# Altium integrated library passive.IntLib: 122 symbols (part 1 of 2)
Pins are listed as number, name and electrical type; pins without a type are passive.

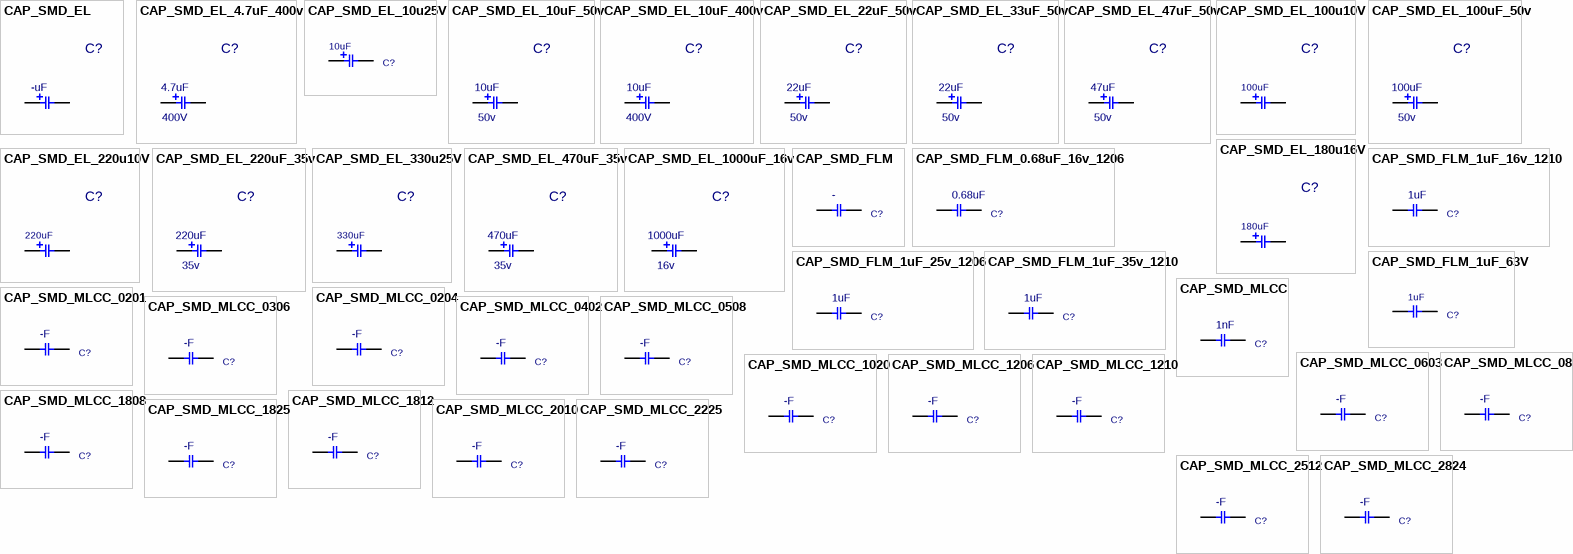
[diagram p0: symbols CAP_SMD_EL to CAP_SMD_MLCC_2824]

## CAP_SMD_EL
designator C?, comment -uF
CAP, SMD, ELEC,; MANF_P#: MANF_PART#; PARAM2: -V; DESC: DESCRIPTION; DIST#: MOUSER; PARAM: 20%; PRICE: 10= -$; MANF: MANF; ASSEMBLY: ASSEMBLY; VALUE: -uF
footprint C_EL_D8L6 (Electrolytic Cap, 8.3X6)
footprint C_EL_D4L4 (Electrolytic Cap, D: 4.3mm, Size B, 3.9mm Height)
footprint C_EL_D5L6 (Electrolytic Cap, D: 5.0mm, L: 5.8mm, Size C)
footprint C_EL_D6L5 (Electrolytic Cap, D: 6.3mm L: 5.4mm, Size D)
footprint C_EL_D10L9 (Electrolytic Cap, 10.3mm, L: 8.7mm)
footprint C_EL_D12L13 (Electrolytic Cap, 12.5x13mm)
footprint C_EL_D4L5 (Electrolytic Cap, D: 4.3mm, Size B, 5.5mm Height)
footprint C_EL_D3L5 (Electrolytic Cap, D: 3.3mm, Size A, 5mm Height)
footprint C_EL_D6L4 (Electrolytic Cap, D: 6.3mm L: 3.9mm, Size D)
footprint C_EL_D6L5A (Electrolytic Cap, D: 6.3mm L: 5.4mm, Size D)
footprint C_EL_D6L6 (Electrolytic Cap, D: 6.3mm L: 5.8mm, Size D)
footprint C_EL_D6L8 (Electrolytic Cap, D: 6.3mm L: 7.7mm, Size D)
footprint C_EL_D8L10 (Electrolytic Cap, Size E, Size F, 8.3X10)
footprint C_EL_D10L10 (Electrolytic Cap, 10.3mm, L: 10mm)
footprint C_EL_D10L12 (Electrolytic Cap, 10.3mm, L: 12.4mm)
footprint C_EL_D16L16 (Electrolytic Cap, 16x16.5mm, size J)
footprint C_EL_D18L16 (Electrolytic Cap, 18x16.5mm, size K)
footprint C_EL_D8L10A (Electrolytic Cap, Size E, Size F, 8.3X10)
footprint C_EL_D5L5 (Electrolytic Cap, D: 5.0mm, L: 5.4mm)
pins: 1, 2

## CAP_SMD_EL_4.7uF_400v
designator C?, comment PARAM2: 400V  (hidden comment: 4.7uF)
CAP, SMD, ELEC,; MANF_P#: MANF_PART#; DESC: DESCRIPTION; DIST#: MOUSER; PARAM: 20%; PRICE: 10= -$; MANF: MANF; ASSEMBLY: ASSEMBLY; VALUE: 4.7uF
footprint C_EL_D8L10 (Electrolytic Cap, Size E, Size F, 8.3X10)
footprint C_EL_D10L10 (Electrolytic Cap, 10.3mm, L: 10mm)
pins: 1, 2

## CAP_SMD_EL_10u25V
designator C?, comment 10uF
CAP, SMD, ELEC, 10uF, 25V; MANF_P#: MANF_PART#; PARAM: 25V; MANF: MANF; PARAM2: PARAM2; VALUE: 10uF
footprint C_EL_4X7 (Capacitor Electrolythic, D4.0X7.0H pitch: 1.5mm)
pins: 1, 2

## CAP_SMD_EL_10uF_50v
designator C?, comment PARAM2: 50v  (hidden comment: 10uF)
CAP, SMD, ELEC,; MANF_P#: MANF_PART#; DESC: DESCRIPTION; DIST#: MOUSER; PARAM: 20%; PRICE: 10= -$; MANF: MANF; ASSEMBLY: ASSEMBLY; VALUE: 10uF
footprint C_EL_D5L5 (Electrolytic Cap, D: 5.0mm, L: 5.4mm)
pins: 1, 2

## CAP_SMD_EL_10uF_400v
designator C?, comment PARAM2: 400V  (hidden comment: 10uF)
CAP, SMD, ELEC,; MANF_P#: MANF_PART#; DESC: DESCRIPTION; DIST#: MOUSER; PARAM: 20%; PRICE: 10= -$; MANF: MANF; ASSEMBLY: ASSEMBLY; VALUE: 10uF
footprint C_EL_D10L12 (Electrolytic Cap, 10.3mm, L: 12.4mm)
pins: 1, 2

## CAP_SMD_EL_22uF_50v
designator C?, comment PARAM2: 50v  (hidden comment: 22uF)
CAP, SMD, ELEC,; MANF_P#: MANF_PART#; DESC: DESCRIPTION; DIST#: MOUSER; PARAM: 20%; PRICE: 10= -$; MANF: MANF; ASSEMBLY: ASSEMBLY; VALUE: 22uF
footprint C_EL_D6L5 (Electrolytic Cap, D: 6.3mm L: 5.4mm, Size D)
pins: 1, 2

## CAP_SMD_EL_33uF_50v
designator C?, comment PARAM2: 50v  (hidden comment: 22uF)
CAP, SMD, ELEC,; MANF_P#: MANF_PART#; DESC: DESCRIPTION; DIST#: MOUSER; PARAM: 20%; PRICE: 10= -$; MANF: MANF; ASSEMBLY: ASSEMBLY; VALUE: 22uF
footprint C_EL_D6L8 (Electrolytic Cap, D: 6.3mm L: 7.7mm, Size D)
pins: 1, 2

## CAP_SMD_EL_47uF_50v
designator C?, comment PARAM2: 50v  (hidden comment: 47uF)
CAP, SMD, ELEC,; MANF_P#: MANF_PART#; DESC: DESCRIPTION; DIST#: MOUSER; PARAM: 20%; PRICE: 10= -$; MANF: MANF; ASSEMBLY: ASSEMBLY; VALUE: 47uF
footprint C_EL_D6L8 (Electrolytic Cap, D: 6.3mm L: 7.7mm, Size D)
pins: 1, 2

## CAP_SMD_EL_100u10V
designator C?, comment 100uF
CAP, SMDD, ELEC, 100uF, 10V; MANF_P#: 875105242010; MANF: Wurth Electronics; DESC: Aluminum Organic Polymer; DIST#: MOUSER; PARAM: 20%, 30mOhmESR, -55~105oC; PRICE: 0.56$; PARAM2: 10V; ASSEMBLY: ASSEMBLY; VALUE: 100uF
footprint C_EL_5 (Electrolytic Cap, D: 5.0mm, L: 5.8mm, Size C)
pins: 1, 2

## CAP_SMD_EL_100uF_50v
designator C?, comment PARAM2: 50v  (hidden comment: 100uF)
CAP, SMD, ELEC,; MANF_P#: MANF_PART#; DESC: DESCRIPTION; DIST#: MOUSER; PARAM: 20%; PRICE: 10= -$; MANF: MANF; ASSEMBLY: ASSEMBLY; VALUE: 100uF
footprint C_EL_D8L10 (Electrolytic Cap, Size E, Size F, 8.3X10)
pins: 1, 2

## CAP_SMD_EL_180u16V
designator C?, comment 180uF
CAP, SMD, ELEC,; MANF_P#: 16SVPE180M; PARAM2: 16V; MANF: Panasonic; DESC: Aluminum Organic Polymer; DIST#: MOUSER; PARAM: 20%, 11mOhmESR, -55~105oC; PRICE: 0.8$; ASSEMBLY: ASSEMBLY; VALUE: 180uF
footprint C_EL_6_8 (Electrolytic Cap, D: 6.3mm L: 7.7mm, Size D)
pins: 1, 2

## CAP_SMD_EL_220u10V
designator C?, comment 220uF
CAP, SMDD, ELEC, 220uF, 10V; MANF_P#: 875105244013; MANF: Wurth Electronics; DESC: Aluminum Organic Polymer; DIST#: MOUSER; PARAM: 20%, 30mOhmESR, -55~105oC; PRICE: 0.66$; PARAM2: 10V; ASSEMBLY: ASSEMBLY; VALUE: 220uF
footprint C_EL_6_6 (Electrolytic Cap, D: 6.3mm L: 5.8mm, Size D)
pins: 1, 2

## CAP_SMD_EL_220uF_35v
designator C?, comment PARAM2: 35v  (hidden comment: 220uF)
CAP, SMD, ELEC,; MANF_P#: MANF_PART#; DESC: DESCRIPTION; DIST#: MOUSER; PARAM: 20%; PRICE: 10= -$; MANF: MANF; ASSEMBLY: ASSEMBLY; VALUE: 220uF
footprint C_EL_D8L10 (Electrolytic Cap, Size E, Size F, 8.3X10)
pins: 1, 2

## CAP_SMD_EL_330u25V
designator C?, comment 330uF
CAP, SMDD, ELEC, 330uF, 25V; MANF_P#: EEE-1EA331UP; PARAM2: 20%; MANF: PANASONIC; DESC: DESCRIPTION; DIST#: MOUSER; PRICE: 10= 5$; ASSEMBLY: ASSEMBLY; PARAM: 25V; VALUE: 330uF
footprint C_EL_8 (Electrolytic Capacitor, Size E, Size F, 8X10)
pins: 1, 2

## CAP_SMD_EL_470uF_35v
designator C?, comment PARAM2: 35v  (hidden comment: 470uF)
CAP, SMD, ELEC,; MANF_P#: MANF_PART#; DESC: DESCRIPTION; DIST#: MOUSER; PARAM: 20%; PRICE: 10= -$; MANF: MANF; ASSEMBLY: ASSEMBLY; VALUE: 470uF
footprint C_EL_D10L10 (Electrolytic Cap, 10.3mm, L: 10mm)
pins: 1, 2

## CAP_SMD_EL_1000uF_16v
designator C?, comment PARAM2: 16v  (hidden comment: 1000uF)
CAP, SMD, ELEC,; MANF_P#: MANF_PART#; DESC: DESCRIPTION; DIST#: MOUSER; PARAM: 20%; PRICE: 10= -$; MANF: MANF; ASSEMBLY: ASSEMBLY; VALUE: 1000uF
footprint C_EL_D10L10 (Electrolytic Cap, 10.3mm, L: 10mm)
pins: 1, 2

## CAP_SMD_FLM
designator C?, comment -
CAP, FILM,; PARAM: Acrylic, MetallizedStacked, 20%, -40~85oC; MANF_P#: ECP-U1C684MA5; MANF: Panasonic; PARAM2: 16V; PRICE: 100= 40$; DESC: -; ASSEMBLY: ASSEMBLY; VALUE: -
footprint C1206 (CHIP Capacitor, 3.2X1.6mm, 1206)
pins: 1, 2

## CAP_SMD_FLM_0.68uF_16v_1206
designator C?, comment 0.68uF
CAP, FILM,; PARAM: Acrylic, MetallizedStacked, 20%, -40~85oC; MANF_P#: ECP-U1C684MA5; MANF: Panasonic; PARAM2: 16V; PRICE: 100= 40$; DESC: -; ASSEMBLY: ASSEMBLY; VALUE: 0.68uF
footprint C1206 (CHIP Capacitor, 3.2X1.6mm, 1206)
pins: 1, 2

## CAP_SMD_FLM_1uF_16v_1210
designator C?, comment 1uF
CAP, FILM,; PARAM: Acrylic, MetallizedStacked, 20%, -40~85oC; MANF_P#: ECP-U1C105MA5; MANF: Panasonic; PARAM2: 16V; PRICE: 100= 36$; DESC: -; ASSEMBLY: ASSEMBLY; VALUE: 1uF
footprint C1210 (CHIP Capacitor, 3.2X2.5mm, 1210, 3225)
pins: 1, 2

## CAP_SMD_FLM_1uF_25v_1206
designator C?, comment 1uF
CAP, FILM,; PARAM: AcrylicMetallized, 20%, -55~125oC; MANF_P#: 25MU105MA23216; MANF: Rubycon; PARAM2: 25V; PRICE: 100= 290$; DESC: -; ASSEMBLY: ASSEMBLY; VALUE: 1uF
footprint C1206 (CHIP Capacitor, 3.2X1.6mm, 1206)
pins: 1, 2

## CAP_SMD_FLM_1uF_35v_1210
designator C?, comment 1uF
CAP, FILM,; PARAM: AcrylicMetallized, 20%, -55~125oC; MANF_P#: 35ST105MB13225; MANF: Rubycon; PARAM2: 35V; PRICE: 100= 270$; DESC: -; ASSEMBLY: ASSEMBLY; VALUE: 1uF
footprint C1210 (CHIP Capacitor, 3.2X2.5mm, 1210, 3225)
pins: 1, 2

## CAP_SMD_FLM_1uF_63V
designator C?, comment 1uF
CAP, FILM; PARAM: PET, 10%, -55~125oC; DESC: CAP, FILM,; MANF_P#: SMDTC04100QB00KQ00; MANF: WIMA; PARAM2: 63VDC/40VAC; PRICE: 2$; ASSEMBLY: ASSEMBLY; VALUE: 1uF
footprint C2225 (Chip Capacitor, 5.6x6.4mm, 2225, 5664, 2220)
pins: 1, 2

## CAP_SMD_MLCC
designator C?, comment 1nF
CAP, MLCC; PARAM: C0G, 10%; DESC: CAP, MLCC, 1nF, 50V, C0G, 10%, 0402; MANF_P#: MANF_PART#; MANF: Murata; PARAM2: 50V; PRICE: 100= 1$; ASSEMBLY: ASSEMBLY; VALUE: 1nF
footprint C0402 (CHIP Capacitor, 1.0X0.5mm, 0402)
footprint C0603 (CHIP Capacitor, 1.6X0.8mm, 0603)
footprint C0805 (CHIP Capacitor, 2.0X1.3mm, 0805)
footprint C1206 (CHIP Capacitor, 3.2X1.6mm, 1206)
footprint C1210 (CHIP Capacitor, 3.2X2.5mm, 1210, 3225)
footprint C0508 (CHIP Capacitor, 1.3X2.0mm, 0508)
footprint C1020 (CHIP Capacitor, 2.50x5.00mm)
footprint C1808 (CHIP Capacitor, 4.6X2.0mm, 1808, 1806, 4620, 4520)
footprint C1812 (Chip Capacitor, 4.5x3.2mm, 1612, 1812, 4532)
footprint C1825 (Chip Capacitor, 4.5x6.4mm, 1825, 4564)
footprint C2225 (Chip Capacitor, 5.6x6.4mm, 2225, 5664)
footprint C2512 (Chip Capacitor, 6.4x3.2mm, 2512, 6432)
footprint C0201 (CHIP Capacitor, 0.5x0.25mm, 0201)
footprint C0306 (CHIP Capacitor, 0.8X1.6mm)
footprint C0204 (CHIP Capacitor, 0.5X1.0mm)
footprint C2010 (Chip Capacitor, 5.0x2.5mm)
pins: 1, 2

## CAP_SMD_MLCC_0201
designator C?, comment -F
CAP, MLCC; PARAM: -, -%; MANF_P#: MANF_PART#; PARAM2: -V; PRICE: 100= 1$; MANF: -; ASSEMBLY: ASSEMBLY; VALUE: -F
footprint C0201 (CHIP Capacitor, 0.5x0.25mm, 0201)
pins: 1, 2

## CAP_SMD_MLCC_0204
designator C?, comment -F
CAP, MLCC; PARAM: -, -%; MANF_P#: MANF_PART#; PARAM2: -V; PRICE: 100= 1$; MANF: -; ASSEMBLY: ASSEMBLY; VALUE: -F
footprint C0204 (CHIP Capacitor, 0.5X1.0mm)
pins: 1, 2

## CAP_SMD_MLCC_0306
designator C?, comment -F
CAP, MLCC; PARAM: -, -%; MANF_P#: MANF_PART#; PARAM2: -V; PRICE: 100= 1$; MANF: -; ASSEMBLY: ASSEMBLY; VALUE: -F
footprint C0306 (CHIP Capacitor, 0.8X1.6mm)
pins: 1, 2

## CAP_SMD_MLCC_0402
designator C?, comment -F
CAP, MLCC; PARAM: -, -%; MANF_P#: MANF_PART#; PARAM2: -V; PRICE: 100= 1$; MANF: -; ASSEMBLY: ASSEMBLY; VALUE: -F
footprint C0402 (CHIP Capacitor, 1.0X0.5mm, 0402)
pins: 1, 2

## CAP_SMD_MLCC_0508
designator C?, comment -F
CAP, MLCC; PARAM: -, -%; MANF_P#: MANF_PART#; PARAM2: -V; PRICE: 100= 1$; MANF: -; ASSEMBLY: ASSEMBLY; VALUE: -F
footprint C0508 (CHIP Capacitor, 1.3X2.0mm, 0508)
pins: 1, 2

## CAP_SMD_MLCC_0603
designator C?, comment -F
CAP, MLCC; PARAM: -, -%; MANF_P#: MANF_PART#; PARAM2: -V; PRICE: 100= 1$; MANF: -; ASSEMBLY: ASSEMBLY; VALUE: -F
footprint C0603 (CHIP Capacitor, 1.6X0.8mm, 0603)
pins: 1, 2

## CAP_SMD_MLCC_0805
designator C?, comment -F
CAP, MLCC; PARAM: -, -%; MANF_P#: MANF_PART#; PARAM2: -V; PRICE: 100= 1$; MANF: -; ASSEMBLY: ASSEMBLY; VALUE: -F
footprint C0805 (CHIP Capacitor, 2.0X1.3mm, 0805)
pins: 1, 2

## CAP_SMD_MLCC_1020
designator C?, comment -F
CAP, MLCC; PARAM: -, -%; MANF_P#: MANF_PART#; PARAM2: -V; PRICE: 100= 1$; MANF: -; ASSEMBLY: ASSEMBLY; VALUE: -F
footprint C1020 (CHIP Capacitor, 2.50x5.00mm)
pins: 1, 2

## CAP_SMD_MLCC_1206
designator C?, comment -F
CAP, MLCC; PARAM: -, -%; MANF_P#: MANF_PART#; PARAM2: -V; PRICE: 100= 1$; MANF: -; ASSEMBLY: ASSEMBLY; VALUE: -F
footprint C1206 (CHIP Capacitor, 3.2X1.6mm, 1206)
pins: 1, 2

## CAP_SMD_MLCC_1210
designator C?, comment -F
CAP, MLCC; PARAM: -, -%; MANF_P#: MANF_PART#; PARAM2: -V; PRICE: 100= 1$; MANF: -; ASSEMBLY: ASSEMBLY; VALUE: -F
footprint C1210 (CHIP Capacitor, 3.2X2.5mm, 1210, 3225)
pins: 1, 2

## CAP_SMD_MLCC_1808
designator C?, comment -F
CAP, MLCC; PARAM: -, -%; MANF_P#: MANF_PART#; PARAM2: -V; PRICE: 100= 1$; MANF: -; ASSEMBLY: ASSEMBLY; VALUE: -F
footprint C1808 (CHIP Capacitor, 4.6X2.0mm, 1808, 1806, 4620, 4520)
pins: 1, 2

## CAP_SMD_MLCC_1812
designator C?, comment -F
CAP, MLCC; PARAM: -, -%; MANF_P#: MANF_PART#; PARAM2: -V; PRICE: 100= 1$; MANF: -; ASSEMBLY: ASSEMBLY; VALUE: -F
footprint C1812 (Chip Capacitor, 4.5x3.2mm, 1612, 1812, 4532)
pins: 1, 2

## CAP_SMD_MLCC_1825
designator C?, comment -F
CAP, MLCC; PARAM: -, -%; MANF_P#: MANF_PART#; PARAM2: -V; PRICE: 100= 1$; MANF: -; ASSEMBLY: ASSEMBLY; VALUE: -F
footprint C1825 (Chip Capacitor, 4.5x6.4mm, 1825, 4564)
pins: 1, 2

## CAP_SMD_MLCC_2010
designator C?, comment -F
CAP, MLCC; PARAM: -, -%; MANF_P#: MANF_PART#; PARAM2: -V; PRICE: 100= 1$; MANF: -; ASSEMBLY: ASSEMBLY; VALUE: -F
footprint C2010 (Chip Capacitor, 5.0x2.5mm)
pins: 1, 2

## CAP_SMD_MLCC_2225
designator C?, comment -F
CAP, MLCC; PARAM: -, -%; MANF_P#: MANF_PART#; PARAM2: -V; PRICE: 100= 1$; MANF: -; ASSEMBLY: ASSEMBLY; VALUE: -F
footprint C2225 (Chip Capacitor, 5.6x6.4mm, 2225, 5664, 2220)
pins: 1, 2

## CAP_SMD_MLCC_2512
designator C?, comment -F
CAP, MLCC; PARAM: -, -%; MANF_P#: MANF_PART#; PARAM2: -V; PRICE: 100= 1$; MANF: -; ASSEMBLY: ASSEMBLY; VALUE: -F
footprint C2512 (Chip Capacitor, 6.4x3.2mm, 2512, 6432)
pins: 1, 2

## CAP_SMD_MLCC_2824
designator C?, comment -F
CAP, MLCC; PARAM: -, -%; MANF_P#: MANF_PART#; PARAM2: -V; PRICE: 100= 1$; MANF: -; ASSEMBLY: ASSEMBLY; VALUE: -F
footprint C2824 (Chip Capacitor, 7.2x6.1x3mm, 2824)
pins: 1, 2

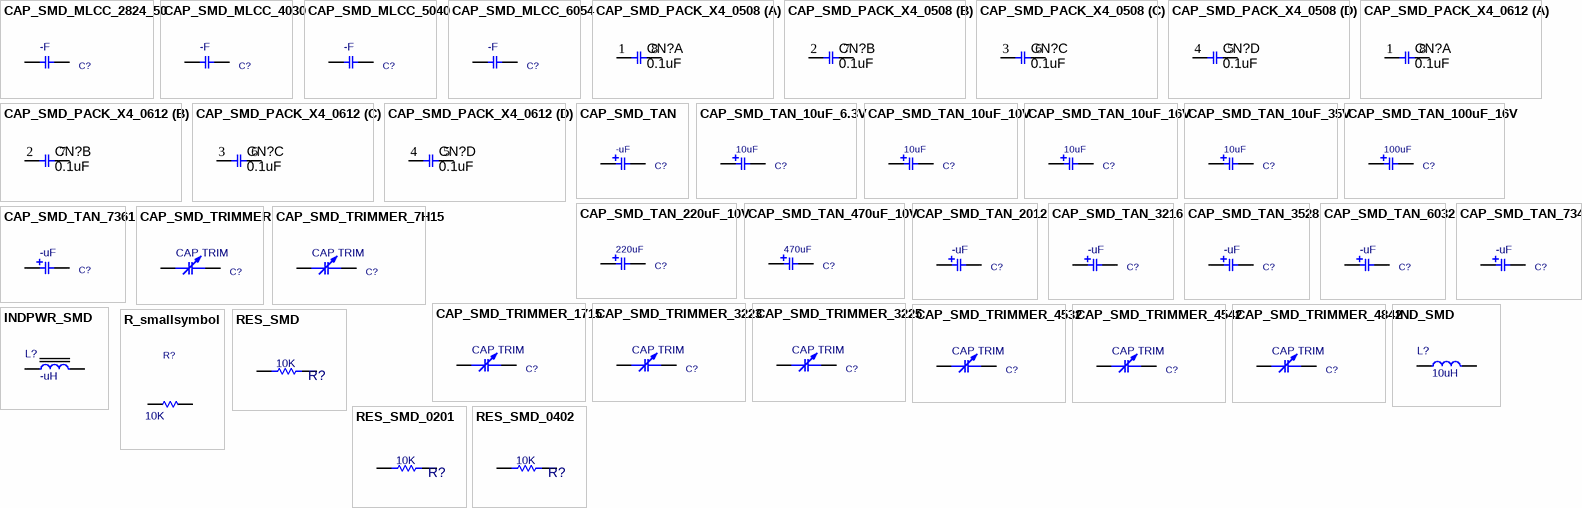
[diagram p1: symbols CAP_SMD_MLCC_2824_50 to RES_SMD_0402]

## CAP_SMD_MLCC_2824_50
designator C?, comment -F
CAP, MLCC; PARAM: -, -%; MANF_P#: MANF_PART#; PARAM2: -V; PRICE: 100= 1$; MANF: -; ASSEMBLY: ASSEMBLY; VALUE: -F
footprint C2824_50 (Chip Capacitor, 7.2x6.1x5mm, 2824)
pins: 1, 2

## CAP_SMD_MLCC_4030
designator C?, comment -F
CAP, MLCC; PARAM: -, -%; MANF_P#: MANF_PART#; PARAM2: -V; PRICE: 100= 1$; MANF: -; ASSEMBLY: ASSEMBLY; VALUE: -F
footprint C4030 (Chip Capacitor, 10.2x7.6x5mm, 4030)
pins: 1, 2

## CAP_SMD_MLCC_5040
designator C?, comment -F
CAP, MLCC; PARAM: -, -%; MANF_P#: MANF_PART#; PARAM2: -V; PRICE: 100= 1$; MANF: -; ASSEMBLY: ASSEMBLY; VALUE: -F
footprint C5040 (Chip Capacitor, 12.7x10.2x6mm, 5040)
pins: 1, 2

## CAP_SMD_MLCC_6054
designator C?, comment -F
CAP, MLCC; PARAM: -, -%; MANF_P#: MANF_PART#; PARAM2: -V; PRICE: 100= 1$; MANF: -; ASSEMBLY: ASSEMBLY; VALUE: -F
footprint C6054 (Chip Capacitor, 15.3x13.7x7mm, 6054)
pins: 1, 2

## CAP_SMD_PACK_X4_0508
designator CN?, comment value 0.1uF  (hidden comment: Film Res Pack)
CAP, SMD, PACKX4; MANF_P#: MANF_PART#; MANF: MANF
footprint CP0402X4 (Capacitor Network, 0508, 0402X4, 1.3x2.0mm)
part A pins: 1, 8
part B pins: 2, 7
part C pins: 3, 6
part D pins: 4, 5

## CAP_SMD_PACK_X4_0612
designator CN?, comment value 0.1uF  (hidden comment: Film Res Pack)
CAP, SMD, PACKX4; MANF_P#: MANF_PART#; MANF: MANF
footprint CP0603X4 (Capacitor Network 0612, 0603X4, 1.6x3.2mm)
part A pins: 1, 8
part B pins: 2, 7
part C pins: 3, 6
part D pins: 4, 5

## CAP_SMD_TAN
designator C?, comment -uF
CAP, SMD, TAN; PARAM: 20%, 300mOhm, -55~105oC; MANF: VISHAY; MANF_P#: T55A106M6R3C0300; PARAM2: 6.3V; PRICE: 0.46$; VALUE: -uF
footprint C_TN_3528 (CAPACITOR, TAN B, TAN H, TAN T, TAN M, 3528P, 1210P, 3.5X2.8mm)
footprint C_TN_3216 (CAPACITOR, TAN A, 1206P, 3.2x1.6mm)
footprint C_TN_2012 (CAPACITOR, TAN N, TAN P, TAN R, 0805P, 2X1.3mm)
footprint C_TN_3216_BLK (CAPACITOR, TAN A, 3.2x1.6mm, BLACK)
footprint C_TN_3528_BLK (CAPACITOR, TAN B, 3.5X2.8mm, BLACK)
footprint C_TN_6032 (CAPACITOR, TAN C, TAN F, TAN U, TAN L, 6032P, 6.0X3.2mm)
footprint C_TN_6032_BLK (CAPACITOR, TAN C, 6.0X3.2mm, BLACK)
footprint C_TN_7343 (CAPACITOR, TAN D, TAN E, TAN Y, TAN X, 7343P, 7.3X4.3mm)
footprint C_TN_7343_31 (CAPACITOR, TAN D, TAN E, TAN Y, TAN X, 7343P, 7.3X4.3mm)
footprint C_TN_7343_31_BLK (CAPACITOR, TAN D, 7.3X4.3mm, BLACK)
footprint C_TN_7361 (CAPACITOR, TAN V, 2924, 7361, 7.3X6.1mm)
pins: 1, 2

## CAP_SMD_TAN_10uF_6.3V
designator C?, comment 10uF
CAP, SMD, TAN; PARAM: 20%, 300mOhm, -55~105oC; MANF: VISHAY; MANF_P#: T55A106M6R3C0300; PARAM2: 6.3V; PRICE: 0.46$; VALUE: 10uF
footprint C_TN_3216 (CAPACITOR, TAN A, 1206P, 3.2x1.6mm)
pins: 1, 2

## CAP_SMD_TAN_10uF_10V
designator C?, comment 10uF
CAP, SMD, TAN; PARAM: 20%, 300mOhm, -55~105oC; MANF: VISHAY; MANF_P#: T55A106M010C0300; PARAM2: 10V; PRICE: 0.46$; VALUE: 10uF
footprint C_TN_3216 (CAPACITOR, TAN A, 1206P, 3.2x1.6mm)
pins: 1, 2

## CAP_SMD_TAN_10uF_16V
designator C?, comment 10uF
CAP, SMD, TAN; PARAM: 20%, 200mOhm, -55~105oC; MANF: AVX; MANF_P#: TCJT106M016R0200; PARAM2: 16V; PRICE: 1$; VALUE: 10uF
footprint C_TN_3528 (CAPACITOR, TAN B, TAN H, TAN T, TAN M, 3528P, 1210P, 3.5X2.8mm)
pins: 1, 2

## CAP_SMD_TAN_10uF_35V
designator C?, comment 10uF
CAP, SMD, TAN; PARAM: 20%, 300mOhm, -55~125oC; MANF: VISHAY; MANF_P#: 593D106X9035D2TE3; PARAM2: 35V; PRICE: 0.8$; VALUE: 10uF
footprint C_TN_7343 (CAPACITOR, TAN D, TAN E, TAN Y, TAN X, 7343P, 7.3X4.3mm)
pins: 1, 2

## CAP_SMD_TAN_100uF_16V
designator C?, comment 100uF
CAP, SMD, TAN; PARAM: 20%, 50mOhm, -55~105oC; MANF: AVX; MANF_P#: TCJD107M016R0050; PARAM2: 16V; PRICE: 1.9$; VALUE: 100uF
footprint C_TN_7343 (CAPACITOR, TAN D, TAN E, TAN Y, TAN X, 7343P, 7.3X4.3mm)
pins: 1, 2

## CAP_SMD_TAN_220uF_10V
designator C?, comment 220uF
CAP, SMD, TAN; PARAM: 20%, 35mOhm, -55~105oC; MANF: VISHAY; MANF_P#: T55D227M6R3C0035; PARAM2: 6.3V; PRICE: 1.9$; VALUE: 220uF
footprint C_TN_7343 (CAPACITOR, TAN D, TAN E, TAN Y, TAN X, 7343P, 7.3X4.3mm)
pins: 1, 2

## CAP_SMD_TAN_470uF_10V
designator C?, comment 470uF
CAP, SMD, TAN; PARAM: 20%, 50mOhm, -55~105oC; MANF: AVX; MANF_P#: TCN4477M016R0100; PARAM2: 16V; PRICE: 4$; VALUE: 470uF
footprint C_TN_7343 (CAPACITOR, TAN D, TAN E, TAN Y, TAN X, 7343P, 7.3X4.3mm)
pins: 1, 2

## CAP_SMD_TAN_2012
designator C?, comment -uF
CAP, SMD, TAN,; PARAM2: -V; VALUE: -uF
footprint C_TN_2012 (CAPACITOR, TAN N, TAN P, TAN R, 0805P, 2X1.3mm)
pins: 1, 2

## CAP_SMD_TAN_3216
designator C?, comment -uF
CAP, SMD, TAN,; PARAM2: -V; VALUE: -uF
footprint C_TN_3216 (CAPACITOR, TAN A, 1206P, 3.2x1.6mm)
pins: 1, 2

## CAP_SMD_TAN_3528
designator C?, comment -uF
CAP, SMD, TAN,; PARAM2: -V; VALUE: -uF
footprint C_TN_3528 (CAPACITOR, TAN B, TAN H, TAN T, TAN M, 3528P, 1210P, 3.5X2.8mm)
pins: 1, 2

## CAP_SMD_TAN_6032
designator C?, comment -uF
CAP, SMD, TAN,; PARAM2: -V; VALUE: -uF
footprint C_TN_6032 (CAPACITOR, TAN C, TAN F, TAN U, TAN L, 6032P, 6.0X3.2mm)
pins: 1, 2

## CAP_SMD_TAN_7343
designator C?, comment -uF
CAP, SMD, TAN,; PARAM2: -V; VALUE: -uF
footprint C_TN_7343 (CAPACITOR, TAN D, TAN E, TAN Y, TAN X, 7343P, 7.3X4.3mm)
pins: 1, 2

## CAP_SMD_TAN_7361
designator C?, comment -uF
CAP, SMD, TAN,; PARAM2: -V; VALUE: -uF
footprint C_TN_7361 (CAPACITOR, TAN V, 2924, 7361, 7.3X6.1mm)
pins: 1, 2

## CAP_SMD_TRIMMER
designator C?, comment CAP TRIM
CAP, SMD, TRIMMER; MANF_P#: MANF_PART#; PARAM: PARAM; PRICE: 100= 1$; DESC: CAP, SMD, TRIMMER; MANF: MANF; PARAM2: PARAM2; ASSEMBLY: ASSEMBLY; VALUE: CAP TRIM
footprint C_TRM_1715 (Cap, Trimmer TZR1 1.7mmX1.5mm)
footprint C_TRM_3225 (Cap, Trimmer TZY2 3.2mmX2.5mm)
footprint C_TRM_4532 (Cap, Trimmer TZC3 4.5X3.2mm)
footprint C_TRM_4842 (Cap, Trimmer SMD 4.8x4.2mm)
footprint C_TRM_3223 (Cap, Trimmer TZV2 2.3mmX3.2mm)
footprint C_TRM_4542 (Cap, Trimmer TZB4 4.5X4.2mm)
footprint C_TRM_7H15 (Cap Air, Trimmer JOHANSON 1585, >8 Turn, 7.1x H 14.8mm)
pins: 1, 2

## CAP_SMD_TRIMMER_7H15
designator C?, comment CAP TRIM
CAP, SMD, TRIMMER; MANF_P#: MANF_PART#; PARAM: PARAM; PRICE: 100= 1$; DESC: CAP, SMD, TRIMMER; MANF: MANF; PARAM2: PARAM2; ASSEMBLY: ASSEMBLY; VALUE: CAP TRIM
footprint C_TRM_7H15 (Cap Air, Trimmer JOHANSON 1585, >8 Turn, 7.1x H 14.8mm)
pins: 1, 2

## CAP_SMD_TRIMMER_1715
designator C?, comment CAP TRIM
CAP, SMD, TRIMMER; MANF_P#: MANF_PART#; PARAM: PARAM; PRICE: 100= 1$; DESC: CAP, SMD, TRIMMER; MANF: MANF; PARAM2: PARAM2; ASSEMBLY: ASSEMBLY; VALUE: CAP TRIM
footprint C_TRM_1715 (Cap, Trimmer TZR1 1.7mmX1.5mm)
pins: 1, 2

## CAP_SMD_TRIMMER_3223
designator C?, comment CAP TRIM
CAP, SMD, TRIMMER; MANF_P#: MANF_PART#; PARAM: PARAM; PRICE: 100= 1$; DESC: CAP, SMD, TRIMMER; MANF: MANF; PARAM2: PARAM2; ASSEMBLY: ASSEMBLY; VALUE: CAP TRIM
footprint C_TRM_3223 (Cap, Trimmer TZV2 2.3mmX3.2mm)
pins: 1, 2

## CAP_SMD_TRIMMER_3225
designator C?, comment CAP TRIM
CAP, SMD, TRIMMER; MANF_P#: MANF_PART#; PARAM: PARAM; PRICE: 100= 1$; DESC: CAP, SMD, TRIMMER; MANF: MANF; PARAM2: PARAM2; ASSEMBLY: ASSEMBLY; VALUE: CAP TRIM
footprint C_TRM_3225 (Cap, Trimmer TZY2 3.2mmX2.5mm)
pins: 1, 2

## CAP_SMD_TRIMMER_4532
designator C?, comment CAP TRIM
CAP, SMD, TRIMMER; MANF_P#: MANF_PART#; PARAM: PARAM; PRICE: 100= 1$; DESC: CAP, SMD, TRIMMER; MANF: MANF; PARAM2: PARAM2; ASSEMBLY: ASSEMBLY; VALUE: CAP TRIM
footprint C_TRM_4532 (Cap, Trimmer TZC3 4.5X3.2mm)
pins: 1, 2

## CAP_SMD_TRIMMER_4542
designator C?, comment CAP TRIM
CAP, SMD, TRIMMER; MANF_P#: MANF_PART#; PARAM: PARAM; PRICE: 100= 1$; DESC: CAP, SMD, TRIMMER; MANF: MANF; PARAM2: PARAM2; ASSEMBLY: ASSEMBLY; VALUE: CAP TRIM
footprint C_TRM_4542 (Cap, Trimmer TZB4 4.5X4.2mm)
pins: 1, 2

## CAP_SMD_TRIMMER_4842
designator C?, comment CAP TRIM
CAP, SMD, TRIMMER; MANF_P#: MANF_PART#; PARAM: PARAM; PRICE: 100= 1$; DESC: CAP, SMD, TRIMMER; MANF: MANF; PARAM2: PARAM2; ASSEMBLY: ASSEMBLY; VALUE: CAP TRIM
footprint C_TRM_4842 (Cap, Trimmer SMD 4.8x4.2mm)
pins: 1, 2

## IND_SMD
designator L?, comment 10uH
INDUCTOR, SMD; VALUE: 10uH
footprint L0603 (INDUCTOR, FERRITE BEAD, 0603, 1.6X0.8mm)
pins: 1, 2

## INDPWR_SMD
designator L?, comment -uH
INDUCTOR, POWER, SMD; VALUE: -uH
footprint L_12 (INDUCTOR, 13.5x12.5mm, DR125, CDRH127, D128C 931AS)
footprint L_3 (INDUCTOR, 3.0X3.2mm, VLS3012)
footprint L_4 (INDUCTOR, 3.8x3.8mm, 3.7x3.5mm, WURTH 744031470)
footprint L_5 (INDUCTOR, 5.0X5.0mm)
footprint L_6 (INDUCTOR, 6.0X6.0mm)
footprint L_7 (INDUCTOR, 7.2X6.9mm, 7.1X6.5mm, SPM6530)
footprint L_8 (INDUCTOR, 7.5X7.5mm, 8x8, DR74)
footprint L_10 (INDUCTOR, 10.35X10.35mm, CDRH104R, MSS1038 (coilcraft))
footprint L_2 (INDUCTOR, 2.0X2.0mm)
footprint L1007 (INDUCTOR, 2518 [1007], 2.5X1.8mm)
footprint L1008 (INDUCTOR, 2520 1008, 2.5X2.0mm)
footprint L_5_CD54 (INDUCTOR, 5.2x5.8x4.5mm)
pins: 1, 2

## R_smallsymbol
designator R?, comment 10K
VALUE: 10K
pins: 1, 2

## RES_SMD
designator R?, comment 10K
RESISTOR, SMD; PARAM: -W; DESC: DESCRIPTION; DIST#: MOUSER; PARAM2: 1%; MANF_P#: -; MANF: -; ASSEMBLY: ASSEMBLY; PRICE: 100= 0.5$; VALUE: 10K
footprint R0402 (CHIP Resistor 1/16 WATT, 1.0X0.5mm, 0402, 1005)
footprint R0603 (CHIP Resistor 1/10 WATT, 1.6x0.8mm, 0603, 1608)
footprint R0805 (CHIP RESISTOR 1/8 WATT ,2.0X1.3mm, 0805, 2012)
footprint R1206 (CHIP RESISTOR 1/4 WATT, Body 3.2x1.6mm,1206, 3216)
footprint R2512 (CHIP RESISTOR 1 WATT, 6.4X3.2mm, 2512, 6432)
footprint R2010 (CHIP RESISTOR 3/4 WATT, 5.1x3mm, 2010, 5025)
footprint R1210 (CHIP RESISTOR 1/2 WATT, Body 3.2x2.5mm,1210, 3225)
footprint R0201 (CHIP Capacitor, 0.5x0.25mm, 0201)
pins: 1, 2

## RES_SMD_0201
designator R?, comment 10K
RESISTOR, SMD; PARAM: 1%, 50mW; DESC: DESCRIPTION; DIST#: MOUSER; MANF_P#: -; MANF: -; ASSEMBLY: ASSEMBLY; PRICE: -; PARAM2: -; VALUE: 10K
footprint R0201 (CHIP Capacitor, 0.5x0.25mm, 0201)
pins: 1, 2

## RES_SMD_0402
designator R?, comment 10K
RESISTOR, SMD; PARAM: 1%, 62.5mW; DESC: DESCRIPTION; DIST#: MOUSER; MANF_P#: -; MANF: -; ASSEMBLY: ASSEMBLY; PRICE: -; PARAM2: -; VALUE: 10K
footprint R0402 (CHIP Resistor 1/16 WATT, 1.0X0.5mm, 0402, 1005)
pins: 1, 2

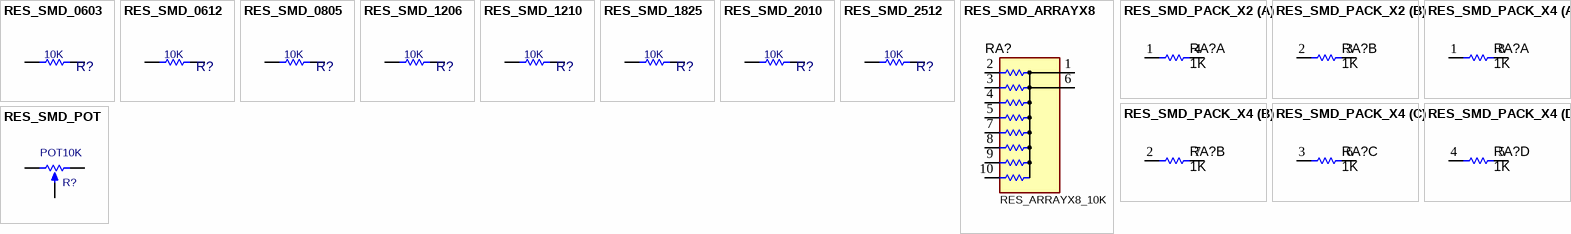
[diagram p2: symbols RES_SMD_0603 to RES_SMD_POT]

## RES_SMD_0603
designator R?, comment 10K
RESISTOR, SMD; PARAM: 1%, 0.1W; DESC: DESCRIPTION; DIST#: MOUSER; MANF_P#: -; MANF: -; ASSEMBLY: ASSEMBLY; PRICE: -; PARAM2: -; VALUE: 10K
footprint R0603 (CHIP Resistor 1/10 WATT, 1.6x0.8mm, 0603, 1608)
pins: 1, 2

## RES_SMD_0612
designator R?, comment 10K
RESISTOR, SMD; PARAM: 1%, 0.25W; DESC: DESCRIPTION; DIST#: MOUSER; MANF_P#: -; MANF: -; ASSEMBLY: ASSEMBLY; PRICE: 100= 0.5$; PARAM2: -; VALUE: 10K
footprint R0612 (CHIP RESISTOR 1/4 WATT, Body 1.6x3.2mm, 1632, 0612)
pins: 1, 2

## RES_SMD_0805
designator R?, comment 10K
RESISTOR, SMD; PARAM: -W; DESC: DESCRIPTION; DIST#: MOUSER; PARAM2: 1%; MANF_P#: -; MANF: -; ASSEMBLY: ASSEMBLY; PRICE: 100= 0.5$; VALUE: 10K
footprint R0805 (CHIP RESISTOR 1/8 WATT ,2.0X1.3mm, 0805, 2012)
pins: 1, 2

## RES_SMD_1206
designator R?, comment 10K
RESISTOR, SMD; PARAM: 1%, 0.25W; DESC: DESCRIPTION; DIST#: MOUSER; MANF_P#: -; MANF: -; ASSEMBLY: ASSEMBLY; PRICE: -; PARAM2: -; VALUE: 10K
footprint R1206 (CHIP RESISTOR 1/4 WATT, Body 3.2x1.6mm,1206, 3216)
pins: 1, 2

## RES_SMD_1210
designator R?, comment 10K
RESISTOR, SMD; PARAM: 1%, 0.5W; DESC: DESCRIPTION; DIST#: MOUSER; MANF_P#: -; MANF: -; ASSEMBLY: ASSEMBLY; PRICE: 100= 0.5$; PARAM2: -; VALUE: 10K
footprint R1210 (CHIP RESISTOR 1/2 WATT, Body 3.2x2.5mm,1210, 3225)
pins: 1, 2

## RES_SMD_1825
designator R?, comment 10K
RESISTOR, SMD; PARAM: -W; DESC: DESCRIPTION; DIST#: MOUSER; MANF_P#: -; MANF: -; ASSEMBLY: ASSEMBLY; PRICE: -; PARAM2: -; VALUE: 10K
footprint R1825 (CHIP Resistor, 5.1x3.0mm, 4.6X6.4mm, 1825, 4565)
pins: 1, 2

## RES_SMD_2010
designator R?, comment 10K
RESISTOR, SMD; PARAM: 1%, 0.75W; DESC: DESCRIPTION; DIST#: MOUSER; MANF_P#: -; MANF: -; ASSEMBLY: ASSEMBLY; PRICE: -; PARAM2: -; VALUE: 10K
footprint R2010 (CHIP RESISTOR 3/4 WATT, 5.1x3mm, 2010, 5025)
pins: 1, 2

## RES_SMD_2512
designator R?, comment 10K
RESISTOR, SMD; PARAM: 1%, 1W; DESC: DESCRIPTION; DIST#: MOUSER; MANF_P#: -; MANF: -; ASSEMBLY: ASSEMBLY; PRICE: -; PARAM2: -; VALUE: 10K
footprint R2512 (CHIP RESISTOR 1 WATT, 6.4X3.2mm, 2512, 6432)
pins: 1, 2

## RES_SMD_ARRAYX8
designator RA?, comment RES_ARRAYX8_10K
RESISTOR, SMD, ARRAYX8,; MANF: Panasonic - ECG; MANF_P#: EXB-E10C103J; PARAM2: 5%; Value: RES_ARRAYX8_10K
footprint RARRX8_4021 (Resistor ARRAY X8, SMD, 4.0x2.1mm)
pins: 1 COM, 2, 3, 4, 5, 6 COM, 7, 8, 9, 10

## RES_SMD_PACK_X2
designator RA?, comment 1K
RESISTOR, SMD, PACKX4; MANF_P#: EXBV4V, 742C043; MANF: MANF; Value: 1K
footprint RP0603X2 (RPACK, 0603X2, 742C043, EXBV4V)
part A pins: 1, 4
part B pins: 2, 3

## RES_SMD_PACK_X4
designator RA?, comment 1K
RESISTOR, SMD, PACKX4; MANF_P#: MANF_PART#; MANF: MANF; Value: 1K
footprint RP0603X4 (RPACK, 0603X4, 160X80X4 1206)
footprint RP0402X4 (RPACK, 0804, 0402X4, 100X50X4, 2.00x1.00mm)
part A pins: 1, 8
part B pins: 2, 7
part C pins: 3, 6
part D pins: 4, 5

## RES_SMD_POT
designator R?, comment POT10K
RESISTOR, SMD, Potentiometer; VALUE: POT10K
footprint POTS_3MM (POT SMD, 3.0X3.0mm, Trimming PVG3A PVZ3A)
footprint POTS_3214W (POT SMD, 4.0X5.0mm, Trimming SM-42/43W 3214W)
footprint POTS_3314G (POT SMD, 5.0X5.0mm, Trimming, 3314G)
footprint POTS_5MM (POT SMD, 5.0X5.0mm, Trimming PVG5H)
pins: 1 TOP, 2 TAP, 3 BOT


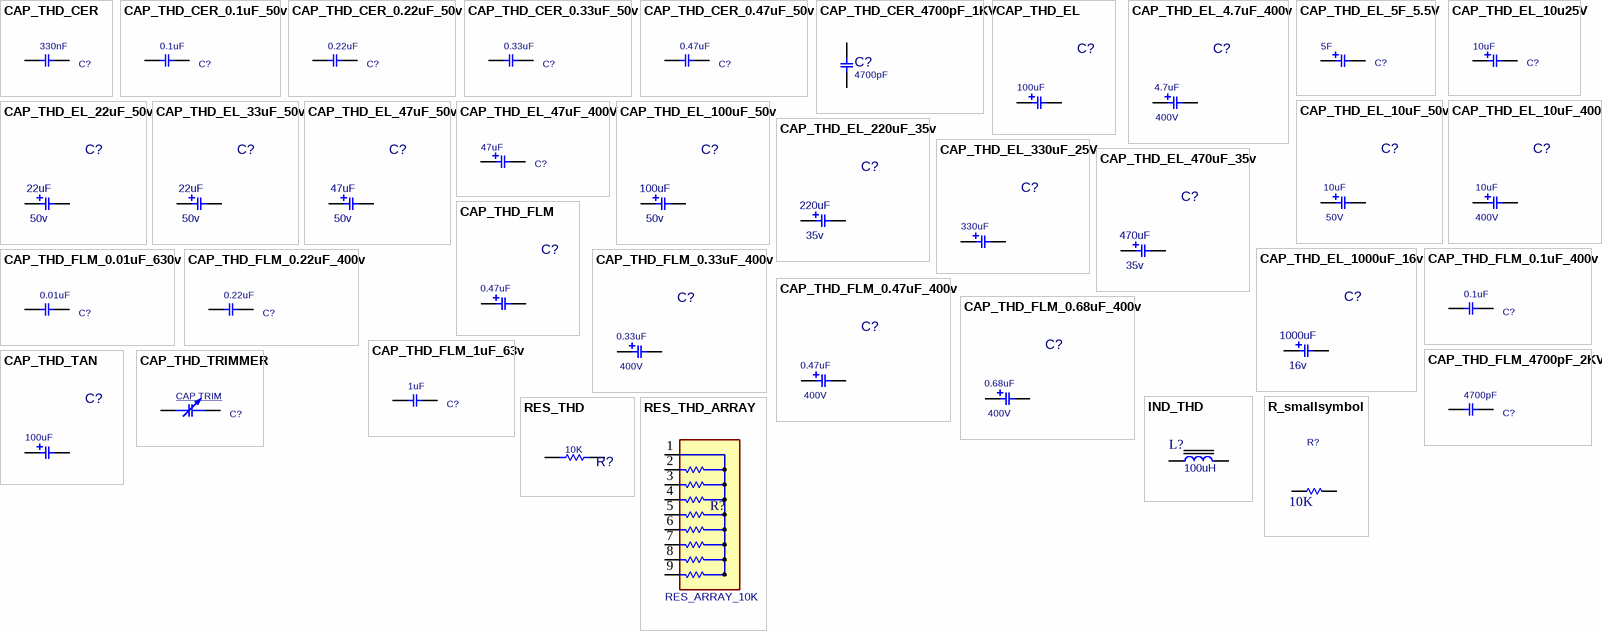
[diagram p3: symbols CAP_THD_CER to RES_THD_ARRAY]

## CAP_THD_CER
designator C?, comment 330nF
CAP, THD, CER MULTI LAYER,; DESC: CAP, CER MULTI LAYER,; MANF_P#: MANF_PART#; PARAM2: 50V; PRICE: 100= 1$; MANF: MANF; ASSEMBLY: ASSEMBLY; VALUE: 330nF
footprint C_CERM_D3 (CAP, CER MULTILAYER, D:3.5mm, pitch: 2.54mm)
footprint C_CER_D5 (CAP, CER, D:5mm, pitch: 2.5mm)
footprint C_CERM_D6 (CAP, CER MULTILAYER, 6X2mm, pitch: 5mm)
footprint C_CERM_D7 (CAP, CER MULTILAYER, 7.0X2.6mm, pitch: 5.0mm)
footprint C_CERM_D10 (CAP, CER MULTILAYER, 12X4mm, pitch: 7.5mm)
footprint C_CERM_D4 (CAP, CER MULTILAYER, 4.2X2.0mm, pitch: 5.0mm, TDK FK24)
footprint C_CERM_D5 (CAP, CER MULTILAYER, 5.0X2.5mm, pitch: 2.5mm, RAD0.1)
footprint C_CERM_D5X3 (CAP, CER,)
footprint C_CERM_D5E (CAP, CER, High Voltage MultiLayer)
footprint C_CERM_D8 (CAP, CER, High Voltage MultiLayer)
footprint C_CERM_D8E (CAP, CER, High Voltage MultiLayer)
footprint C_CERM_D8X7 (CAP, CER, High Voltage MultiLayer)
footprint C_CERM_D9X5 (CAP, CER, High Voltage MultiLayer)
footprint C_CERM_D9X7 (CAP, CER, High Voltage MultiLayer)
footprint C_CERM_D9X7E (CAP, CER, High Voltage MultiLayer)
footprint C_CERM_D10X6 (CAP, CER, High Voltage MultiLayer)
footprint C_CERM_D10X7 (CAP, CER, High Voltage MultiLayer)
footprint C_CERM_D12 (CAP, CER, High Voltage MultiLayer)
footprint C_CERM_D12X7 (CAP, CER, High Voltage MultiLayer)
footprint C_CERM_D14 (CAP, CER, High Voltage MultiLayer)
footprint C_CERM_D15X9 (CAP, CER, High Voltage MultiLayer)
footprint C_CERM_D16X5 (CAP, CER, High Voltage MultiLayer)
footprint C_CERM_D18X8 (CAP, CER, High Voltage MultiLayer)
footprint C_CERM_D20X6 (CAP, CER, High Voltage MultiLayer)
footprint C_CERM_D25X8 (CAP, CER, High Voltage MultiLayer)
footprint C_CERM_D25X11 (CAP, CER, High Voltage MultiLayer)
footprint C_CER_D6 (CAP, CER MULTILAYER, 5.8X1.7mm, pitch: 2.5mm)
footprint C_CER_D7 (CAP, CER MULTILAYER, 7.0X1.7mm, pitch: 5.0mm)
footprint C_CER_D8 (CAP, CER, D: 8.3mm, pitch: 5.08mm)
pins: 1, 2

## CAP_THD_CER_0.1uF_50v
designator C?, comment 0.1uF
CAP, THD, CER MULTI LAYER,; DESC: CAP, CER MULTI LAYER,; MANF_P#: MANF_PART#; PARAM2: 50V; PRICE: 100= 1$; MANF: MANF; ASSEMBLY: ASSEMBLY; VALUE: 0.1uF
footprint C_CERM_D4 (CAP, CER MULTILAYER, 4.2X2.0mm, pitch: 5.0mm, TDK FK24)
pins: 1, 2

## CAP_THD_CER_0.22uF_50v
designator C?, comment 0.22uF
CAP, THD, CER MULTI LAYER,; DESC: CAP, CER MULTI LAYER,; MANF_P#: MANF_PART#; PARAM2: 50V; PRICE: 100= 1$; MANF: MANF; ASSEMBLY: ASSEMBLY; VALUE: 0.22uF
footprint C_CERM_D4 (CAP, CER MULTILAYER, 4.2X2.0mm, pitch: 5.0mm, TDK FK24)
pins: 1, 2

## CAP_THD_CER_0.33uF_50v
designator C?, comment 0.33uF
CAP, THD, CER MULTI LAYER,; DESC: CAP, CER MULTI LAYER,; MANF_P#: MANF_PART#; PARAM2: 50V; PRICE: 100= 1$; MANF: MANF; ASSEMBLY: ASSEMBLY; VALUE: 0.33uF
footprint C_CERM_D4 (CAP, CER MULTILAYER, 4.2X2.0mm, pitch: 5.0mm, TDK FK24)
pins: 1, 2

## CAP_THD_CER_0.47uF_50v
designator C?, comment 0.47uF
CAP, THD, CER MULTI LAYER,; DESC: CAP, CER MULTI LAYER,; MANF_P#: MANF_PART#; PARAM2: 50V; PRICE: 100= 1$; MANF: MANF; ASSEMBLY: ASSEMBLY; VALUE: 0.47uF
footprint C_CERM_D4 (CAP, CER MULTILAYER, 4.2X2.0mm, pitch: 5.0mm, TDK FK24)
pins: 1, 2

## CAP_THD_CER_4700pF_1KV
designator C?, comment 4700pF
CAP, CER; MANF_P#: H472K47X7RN63J7R; MANF: Vishay; PARAM: X7R, 10%, , -55~125oC; DESC: CAP, MLCC; DIST#: MOUSER; PARAM2: 1KV; ASSEMBLY: ASSEMBLY; PRICE: 0.17$; VALUE: 4700pF
footprint C_CERM_D12 (CAP, CER, High Voltage MultiLayer)
pins: 1, 2

## CAP_THD_EL
designator C?, comment 100uF
CAP, THD, ELEC,; MANF_P#: MANF_PART#; PARAM2: 25V; DESC: DESCRIPTION; DIST#: MOUSER; PARAM: 20%; PRICE: 10= 5$; MANF: MANF; ASSEMBLY: ASSEMBLY; VALUE: 100uF
footprint C_EL_4X7 (Cap Elec, D4.0X7.0H pitch: 1.5mm)
footprint C_EL_5X7 (Cap Elec, D5.0X7.0H pitch: 2mm)
footprint C_EL_5X11 (Cap Elec, D5.0X11.0H pitch: 2mm)
footprint C_EL_6X11 (Cap Elec, D6.3X11.0H pitch: 2.5mm)
footprint C_EL_8X12 (Cap Elec, D8.0X12.0H pitch: 3.5mm, RB.14/.26, RB.15/.32)
footprint C_EL_8X12R (Cap Elec, D8.0X12.0H pitch: 3.5mm, RIGHT ANGLE)
footprint C_EL_10X20 (Cap Elec, D10.0X20.0H pitch: 5.0mm, RB.2/.4)
footprint C_EL_12X25 (Cap Elec, D12.0X25.0H pitch: 5.0mm, RB.2/.5)
footprint C_EL_16X25 (Cap Elec, D16.0X25.0H pitch: 7.6mm, RB.3/.6)
footprint C_EL_18X35 (Cap Elec, D18.0X35.0H pitch: 7.6mm, RB.3/.7)
footprint C_EL_20X35 (Cap Elec, D20.0X35.0H pitch: 10.0mm, RB.4/.8)
footprint C_EL_25X40 (Cap Elec, D25.0X40.0H pitch: 12.8mm, RB.5/1)
footprint C_EL_30X50 (Cap Elec, D30.0X50.0H pitch: 10.0mm)
footprint C_EL_35X30 (Cap Elec, D35.0X30.0H pitch: 10.0mm, 470uF/400V, RB.44/1.3)
footprint C_EL_10X12 (Footprint not found)
footprint C_EL_6X12R (Capacitor Electrolythic, D6.3X12.0H pitch: 2.5mm)
footprint C_EL_5X12 (Capacitor Electrolythic, D5X12H pitch: 2mm)
footprint C_EL_5X20 (Capacitor Electrolythic, D5X20H pitch: 2.5mm)
footprint C_EL_6X12 (Capacitor Electrolythic, D6.3X12H pitch: 2.5mm)
footprint C_EL_6X7 (Capacitor Electrolythic, D6.3X7.0H pitch: 2.5mm)
footprint C_EL_8X14 (Capacitor Electrolythic, D8X14H pitch: 3.5mm)
footprint C_EL_8X20 (Capacitor Electrolythic, D8X14H pitch: 3.5mm)
footprint C_EL_10X16 (Capacitor Electrolythic, D10.0X16.0H pitch: 5.0mm)
footprint C_EL_10X16R (Capacitor Electrolythic, D10.0X16.0H pitch: 5.0mm)
footprint C_EL_10X20R (Capacitor Electrolythic, D10X20H pitch: 5.0mm)
footprint C_EL_10X25R (Capacitor Electrolythic, D10X25H pitch: 5mm)
footprint C_EL_10X30 (Capacitor Electrolythic, D10X30H pitch: 5mm)
footprint C_EL_10X30R (Capacitor Electrolythic, D10X30H pitch: 5mm)
footprint C_EL_10X40R (Capacitor Electrolythic, D10X40H pitch: 5mm)
footprint C_EL_10X45R (Capacitor Electrolythic, D10X45H pitch: 5mm)
footprint C_EL_10X50R (Capacitor Electrolythic, D10X50H pitch: 5mm)
footprint C_EL_12X15 (Capacitor Electrolythic, D12.5X15H pitch: 5mm)
footprint C_EL_12X20 (Capacitor Electrolythic, D12.5X20H pitch: 5mm)
footprint C_EL_12X20R (Capacitor Electrolythic, D12.5X20H pitch: 5mm)
footprint C_EL_12X25R (Capacitor Electrolythic, D12.5X25H pitch: 5mm)
footprint C_EL_12X30 (Capacitor Electrolythic, D12.5X30H pitch: 5mm)
footprint C_EL_12X30R (Capacitor Electrolythic, D12.5X30H pitch: 5mm)
footprint C_EL_12X35 (Capacitor Electrolythic, D12.5X35H pitch: 5mm)
footprint C_EL_12X35R (Capacitor Electrolythic, D12.5X35H pitch: 5mm)
footprint C_EL_12X40 (Capacitor Electrolythic, D12.5X40H pitch: 5mm)
footprint C_EL_12X40R (Capacitor Electrolythic, D12.5X40H pitch: 5mm)
footprint C_EL_12X45 (Capacitor Electrolythic, D12.5X45H pitch: 5mm)
footprint C_EL_12X45R (Capacitor Electrolythic, D12.5X45H pitch: 5mm)
footprint C_EL_12X50 (Capacitor Electrolythic, D12.5X50H pitch: 5mm)
footprint C_EL_12X50R (Capacitor Electrolythic, D12.5X50H pitch: 5mm)
footprint C_EL_13X25 (Capacitor Electrolythic, D13X25H pitch: 5mm)
footprint C_EL_14X20 (Capacitor Electrolythic, D14.5X20H pitch: 7.4mm)
footprint C_EL_14X20R (Capacitor Electrolythic, D14.5X20H pitch: 7.4mm)
footprint C_EL_14X25 (Capacitor Electrolythic, D14.5X25H pitch: 7.4mm)
footprint C_EL_14X25R (Capacitor Electrolythic, D14.5X25H pitch: 7.4mm)
footprint C_EL_14X30 (Capacitor Electrolythic, D14.5X30H pitch: 7.4mm)
footprint C_EL_14X30R (Capacitor Electrolythic, D14.5X30H pitch: 7.4mm)
footprint C_EL_14X35 (Capacitor Electrolythic, D14.5X35H pitch: 7.4mm)
footprint C_EL_14X35R (Capacitor Electrolythic, D14.5X35H pitch: 7.4mm)
footprint C_EL_14X40 (Capacitor Electrolythic, D14.5X40H pitch: 7.4mm)
footprint C_EL_14X40R (Capacitor Electrolythic, D14.5X40H pitch: 7.4mm)
footprint C_EL_14X45 (Capacitor Electrolythic, D14.5X45H pitch: 7.4mm)
footprint C_EL_14X45R (Capacitor Electrolythic, D14.5X45H pitch: 7.4mm)
footprint C_EL_14X50 (Capacitor Electrolythic, D14.5X50H pitch: 7.4mm)
footprint C_EL_14X50R (Capacitor Electrolythic, D14.5X50H pitch: 7.4mm)
footprint C_EL_16X15 (Capacitor Electrolythic, D16X15H pitch: 7.4mm)
footprint C_EL_16X20 (Capacitor Electrolythic, D16X20H pitch: 7.4mm)
footprint C_EL_16X20R (Capacitor Electrolythic, D16X20H pitch: 7.4mm)
footprint C_EL_16x25R (Capacitor Electrolythic, D16X25H pitch: 7.4mm)
footprint C_EL_16X31 (Capacitor Electrolythic, D16X31H pitch: 7.4mm)
footprint C_EL_16X31R (Capacitor Electrolythic, D16X31H pitch: 7.4mm)
footprint C_EL_16X35R (Capacitor Electrolythic, D16X35H pitch: 7.4mm)
footprint C_EL_16X35 (Capacitor Electrolythic, D16X35H pitch: 7.4mm)
footprint C_EL_16X40 (Capacitor Electrolythic, D16X40H pitch: 7.4mm)
footprint C_EL_16X40R (Capacitor Electrolythic, D16X40H pitch: 7.4mm)
footprint C_EL_16X45 (Capacitor Electrolythic, D16X45H pitch: 7.4mm)
footprint C_EL_16X45R (Capacitor Electrolythic, D16X45H pitch: 7.4mm)
footprint C_EL_16X50 (Capacitor Electrolythic, D16X50H pitch: 7.4mm)
footprint C_EL_16X50R (Capacitor Electrolythic, D16X50H pitch: 7.4mm)
footprint C_EL_18X20 (Capacitor Electrolythic, D18X20H pitch: 7.4mm)
footprint C_EL_18X20R (Capacitor Electrolythic, D18X20H pitch: 7.4mm)
footprint C_EL_18X25 (Capacitor Electrolythic, D18X25H pitch: 7.4mm)
footprint C_EL_18X25R (Capacitor Electrolythic, D18X25H pitch: 7.4mm)
footprint C_EL_18X31 (Capacitor Electrolythic, D18X31H pitch: 7.4mm)
footprint C_EL_18X31R (Capacitor Electrolythic, D18X31H pitch: 7.4mm)
footprint C_EL_18X35R (Capacitor Electrolythic, D18X35H pitch: 7.4mm)
footprint C_EL_18X40 (Capacitor Electrolythic, D18X40H pitch: 7.4mm)
footprint C_EL_18X45 (Capacitor Electrolythic, D18X45H pitch: 7.4mm)
footprint C_EL_18X40R (Capacitor Electrolythic, D18X40H pitch: 7.4mm)
footprint C_EL_18X45R (Capacitor Electrolythic, D18X45H pitch: 7.4mm)
footprint C_EL_18X50 (Capacitor Electrolythic, D18X50H pitch: 7.4mm)
footprint C_EL_18X50R (Capacitor Electrolythic, D18X50H pitch: 7.4mm)
footprint C_EL_26X13X27 (Cap Elec, 26X13X27mm, 18mm pitch)
pins: 1, 2

## CAP_THD_EL_4.7uF_400v
designator C?, comment PARAM2: 400V  (hidden comment: 4.7uF)
CAP, THD, ELEC,; MANF_P#: MANF_PART#; DESC: DESCRIPTION; DIST#: MOUSER; PARAM: 20%; PRICE: 10= 5$; MANF: MANF; ASSEMBLY: ASSEMBLY; VALUE: 4.7uF
footprint C_EL_8X12 (Capacitor Electrolythic, D8.0X12.0H pitch: 3.5mm)
footprint C_EL_10X16R (Capacitor Electrolythic, D10.0X16.0H pitch: 5.0mm)
pins: 1, 2

## CAP_THD_EL_5F_5.5V
designator C?, comment 5F
CAP, SMD, ELEC, 5F, 5.5V; MANF: Illinois Capacitor; MANF_P#: DGH505Q5R5; PARAM: 5F; PARAM2: 5.5V; PRICE: 4.6$; VALUE: 5F
footprint C_EL_26X13X27 (Cap Elec, 26X13X27mm, 18mm pitch)
pins: 1, 2

## CAP_THD_EL_10u25V
designator C?, comment 10uF
CAP, THD, ELEC, 10uF, 25V; MANF_P#: MANF_PART#; PARAM: 25V; MANF: MANF; PARAM2: PARAM2; VALUE: 10uF
footprint C_EL_4X7 (Cap Elec dia:4mm height: 7mm pitch: 1.5mm)
pins: 1, 2

## CAP_THD_EL_10uF_50v
designator C?, comment PARAM2: 50V  (hidden comment: 10uF)
CAP, THD, ELEC,; MANF_P#: MANF_PART#; DESC: DESCRIPTION; DIST#: MOUSER; PARAM: 20%; PRICE: 10= 5$; MANF: MANF; ASSEMBLY: ASSEMBLY; VALUE: 10uF
footprint C_EL_5X11 (Capacitor Electrolythic, D5.0X11.0H pitch: 2mm)
pins: 1, 2

## CAP_THD_EL_10uF_400v
designator C?, comment PARAM2: 400V  (hidden comment: 10uF)
CAP, THD, ELEC,; MANF_P#: MANF_PART#; DESC: DESCRIPTION; DIST#: MOUSER; PARAM: 20%; PRICE: 10= 5$; MANF: MANF; ASSEMBLY: ASSEMBLY; VALUE: 10uF
footprint C_EL_8X12 (Capacitor Electrolythic, D8.0X12.0H pitch: 3.5mm)
pins: 1, 2

## CAP_THD_EL_22uF_50v
designator C?, comment PARAM2: 50v  (hidden comment: 22uF)
CAP, THD, ELEC,; MANF_P#: MANF_PART#; DESC: DESCRIPTION; DIST#: MOUSER; PARAM: 20%; PRICE: 10= -$; MANF: MANF; ASSEMBLY: ASSEMBLY; VALUE: 22uF
footprint C_EL_5X11 (Capacitor Electrolythic, D5.0X11.0H pitch: 2mm)
pins: 1, 2

## CAP_THD_EL_33uF_50v
designator C?, comment PARAM2: 50v  (hidden comment: 22uF)
CAP, THD, ELEC,; MANF_P#: MANF_PART#; DESC: DESCRIPTION; DIST#: MOUSER; PARAM: 20%; PRICE: 10= -$; MANF: MANF; ASSEMBLY: ASSEMBLY; VALUE: 22uF
footprint C_EL_6X12 (Capacitor Electrolythic, D6.3X12H pitch: 2.5mm)
pins: 1, 2

## CAP_THD_EL_47uF_50v
designator C?, comment PARAM2: 50v  (hidden comment: 47uF)
CAP, THD, ELEC,; MANF_P#: MANF_PART#; DESC: DESCRIPTION; DIST#: MOUSER; PARAM: 20%; PRICE: 10= -$; MANF: MANF; ASSEMBLY: ASSEMBLY; VALUE: 47uF
footprint C_EL_6X12 (Capacitor Electrolythic, D6.3X12H pitch: 2.5mm)
pins: 1, 2

## CAP_THD_EL_47uF_400V
designator C?, comment 47uF
CAP, ELEC; PARAM: 400V; MANF_P#: MANF_PART#; MANF: MANF; PARAM2: PARAM2; VALUE: 47uF
footprint C_EL_16X25 (Cap Elec, D16.0X25.0H pitch: 7.6mm, RB.3/.6)
footprint C_EL_16X25R (Capacitor Electrolythic, D16X25H pitch: 7.4mm)
pins: 1, 2

## CAP_THD_EL_100uF_50v
designator C?, comment PARAM2: 50v  (hidden comment: 100uF)
CAP, THD, ELEC,; MANF_P#: MANF_PART#; DESC: DESCRIPTION; DIST#: MOUSER; PARAM: 20%; PRICE: 10= -$; MANF: MANF; ASSEMBLY: ASSEMBLY; VALUE: 100uF
footprint C_EL_8X12 (Capacitor Electrolythic, D8.0X12.0H pitch: 3.5mm)
pins: 1, 2

## CAP_THD_EL_220uF_35v
designator C?, comment PARAM2: 35v  (hidden comment: 220uF)
CAP, THD, ELEC,; MANF_P#: MANF_PART#; DESC: DESCRIPTION; DIST#: MOUSER; PARAM: 20%; PRICE: 10= -$; MANF: MANF; ASSEMBLY: ASSEMBLY; VALUE: 220uF
footprint C_EL_8X12 (Capacitor Electrolythic, D8.0X12.0H pitch: 3.5mm)
pins: 1, 2

## CAP_THD_EL_330uF_25V
designator C?, comment 330uF
CAP, THD, ELEC; MANF_P#: EEE-1EA331UP; PARAM2: 20%; MANF: PANASONIC; DESC: DESCRIPTION; DIST#: MOUSER; PARAM: 25V; PRICE: 10= 5$; ASSEMBLY: ASSEMBLY; VALUE: 330uF
footprint C_EL_8X12 (Cap Elec dia:8mm height: 12mm pitch: 3.5mm)
pins: 1, 2

## CAP_THD_EL_470uF_35v
designator C?, comment PARAM2: 35v  (hidden comment: 470uF)
CAP, THD, ELEC,; MANF_P#: MANF_PART#; DESC: DESCRIPTION; DIST#: MOUSER; PARAM: 20%; PRICE: 10= -$; MANF: MANF; ASSEMBLY: ASSEMBLY; VALUE: 470uF
footprint C_EL_10X16 (Capacitor Electrolythic, D10.0X16.0H pitch: 5.0mm)
pins: 1, 2

## CAP_THD_EL_1000uF_16v
designator C?, comment PARAM2: 16v  (hidden comment: 1000uF)
CAP, THD, ELEC,; MANF_P#: MANF_PART#; DESC: DESCRIPTION; DIST#: MOUSER; PARAM: 20%; PRICE: 10= -$; MANF: MANF; ASSEMBLY: ASSEMBLY; VALUE: 1000uF
footprint C_EL_10X16 (Capacitor Electrolythic, D10.0X16.0H pitch: 5.0mm)
pins: 1, 2

## CAP_THD_FLM
designator C?, comment 0.47uF
CAP, THD, FILM,; MANF_P#: MANF_PART#; PARAM2: 25V; DESC: DESCRIPTION; DIST#: MOUSER; PARAM: 20%; PRICE: 10= 5$; MANF: MANF; ASSEMBLY: ASSEMBLY; VALUE: 0.47uF
footprint C_FLM_4X2H7 (Capacitor, THT, Metallized Polyester Film 4.6X2.5X6.8mm)
footprint C_FLM_4X3H7 (Capacitor, THT, Metallized Polyester Film, 4.6x3.0x7.5mm)
footprint C_FLM_4X4H8 (Capacitor, THT, Metallized Polyester Film with 4.6x3.8x8.5mm LxTxH)
footprint C_FLM_4X4H9 (Capacitor, THT, Metallized Polyester Film, 4.6x4.6x9.2mm)
footprint C_FLM_4X5H10 (Capacitor, THT, Metallized Polyester Film, 4.6x5.5x10.6mm)
footprint C_FLM_6X2H5 (CAP, FILM MKT, 6.3X2.4mm, pitch: 4.7mm)
footprint C_FLM_6X3H5 (CAP, POLYESTER, 5.8X3.5mm pitch: 5.0mm)
footprint C_FLM_6X4H12 (Capacitor, THT, Metallized Polyester Film, 6x4x12mm)
footprint C_FLM_7X2H6 (Capacitor, THT, Metallized Polyester Film with 7.2x2.5x6.5mm LxTxH)
footprint C_FLM_7X2H7 (CAP, POLYESTER, 7.5x2.5x7mm pitch: 5.0mm)
footprint C_FLM_7X3H6 (Capacitor, THT, Metallized Polyester Film with 7.2x3.0x6.5mm LxTxH)
footprint C_FLM_7X3H6R (Capacitor, THT, Metallized Polyester Film with 7.2x3.0x6.5mm LxTxH)
footprint C_FLM_7X3H8 (Capacitor, THT, Metallized Polyester Film with 7.2x3.5x8.5mm LxTxH)
footprint C_FLM_7X3H8R (Capacitor, THT, Metallized Polyester Film with 7.2x3.5x8.0mm LxTxH)
footprint C_FLM_7X4H6 (Capacitor, THT, Metallized Polyester Film with 7.2x4.5x6mm LxTxH)
footprint C_FLM_7X4H9 (Capacitor, THT, Metallized Polyester Film with 7.2x4.5x9.5mm LxTxH)
footprint C_FLM_7X5H7 (Capacitor, THT, Metallized Polyester Film with 7.2x5.5x7mm LxTxH)
footprint C_FLM_7X5H9R (Capacitor, THT, Metallized Polyester Film with 7.6x5.0x9.2mm LxTxH)
footprint C_FLM_7X5H10 (Capacitor, THT, Metallized Polyester Film with 7.2x5.0x10mm LxTxH)
footprint C_FLM_7X5H11 (Capacitor, THT, Metallized Polyester Film with 7.2x5.5x11.5mm LxTxH)
footprint C_FLM_7X5X10 (CAP, POLYESTER, 7.0X5.0x10mm pitch: 5.0mm)
footprint C_FLM_7X6H8 (CAP, POLYESTER, 7.3X6.5mm pitch: 5.0mm)
footprint C_FLM_7X6H7 (Capacitor, THT, Metallized Polyester Film with 7.2x6.5x7.0mm LxTxH)
footprint C_FLM_7X6H10 (Capacitor, THT, Metallized Polyester Film, 7.3x6.5x10)
footprint C_FLM_7X7H8 (Capacitor, THT, Metallized Polyester Film with 7.2x7.2x8.5mm LxTxH)
footprint C_FLM_7X7H10R (Capacitor, THT, Metallized Polyester Film with 7.6x7.0x10.6mm TxHxW)
footprint C_FLM_7X7H13 (Capacitor, THT, Metallized Polyester Film with 7.2x7.2x13mm LxTxH)
footprint C_FLM_7X8H10 (Capacitor, THT, Metallized Polyester Film with 7.2x8.5x10mm LxTxH)
footprint C_FLM_7X8H14 (Capacitor, THT, Metallized Polyester Film with 7.2x8.5x14mm LxTxH)
footprint C_FLM_7X9H10 (CAP, POLYESTER, 7.2X8.5x10mm pitch: 5.0mm)
footprint C_FLM_7X11H16 (Capacitor, THT, Metallized Polyester Film with 7.2x11x16mm LxTxH)
footprint C_FLM_8X8H13R (Capacitor, THT, Metallized Polyester Film with 7.8x7.8x13.0mm LxTxH)
footprint C_FLM_9X6H9 (CAP, POLYESTER, 9.3X5.2mm pitch: 7.6mm)
footprint C_FLM_10X2H7 (Capacitor, THT, Metallized Polyester Film 10x2.5x7mm LxTxH)
footprint C_FLM_10X3H7 (Capacitor, THT, Metallized Polyester Film 10x3x7mm LxTxH)
footprint C_FLM_10X4H7 (Capacitor, THT, Metallized Polyester Film 10x4.5x7mm LxTxH)
footprint C_FLM_10X4H8R (Capacitor, THT, Metallized Polyester Film with 3.5x9.5x10.0mm TxHxW)
footprint C_FLM_10X5H7 (Capacitor, THT, Metallized Polyester Film 10x5x7mm LxTxH)
footprint C_FLM_10X5H8 (CAP, POLYESTER, 10X5.5mm pitch: 7.6mm)
footprint C_FLM_10X6H7 (Capacitor, THT, Metallized Polyester Film with 10x5.7x7mm LxTxH)
footprint C_FLM_10X6X9 (CAP, POLYESTER, 10.5X6.0X9.0mm pitch: 7.6mm)
footprint C_FLM_10X6X12 (CAP, POLYESTER, 10.3X6.0X12.0mm pitch: 7.6mm)
footprint C_FLM_10X7H7 (Capacitor, THT, Metallized Polyester Film 10x7.2x7mm LxTxH)
footprint C_FLM_10X8H9 (CAP, POLYESTER, 10.0X8.0 pitch: 7.6mm)
footprint C_FLM_11X4H8 (CAP, POLYESTER, 11.4X3.8X7.8mm pitch: 10mm, 0.1uF 400V)
footprint C_FLM_12X4H9 (CAP, POLYESTER, 12.5X4.5X9.0 pitch: 10mm)
footprint C_FLM_12X4H10 (Capacitor, THT, Metallized Polyester Film. 12.5x4.5x10mm)
footprint C_FLM_13X3H8 (Capacitor, THT, Metallized Polyester Film 13x3x8.5mm LxTxH)
footprint C_FLM_13X3H9 (Capacitor, THT, Metallized Polyester Film with 13x3x9mm LxTxH)
footprint C_FLM_13X4H8 (Capacitor, THT, Metallized Polyester Film 13.5x4x8.5mm LxTxH)
footprint C_FLM_13X4H9 (Capacitor, THT, Metallized Polyester Film 13x4x9.5mm LxTxH)
footprint C_FLM_13X5H9 (CAP, POLYESTER, 12.8X4.8 pitch: 10mm)
footprint C_FLM_13X5H10 (Capacitor, THT, Metallized Polyester Film 13x5x10mm LxTxH)
footprint C_FLM_13X5H11 (Capacitor, THT, Metallized Polyester Film 13x5x11mm LxTxH)
footprint C_FLM_13X5H12 (Capacitor, THT, Metallized Polyester Film 13x5x12mm LxTxH)
footprint C_FLM_13X6H12 (Capacitor, THT, Metallized Polyester Film with 13x6x12.5mm LxTxH)
footprint C_FLM_13X6H13 (Capacitor, THT, Metallized Polyester Film 13x6x13mm LxTxH)
footprint C_FLM_13X8H12 (Capacitor, THT, Metallized Polyester Film 13x8x12mm LxTxH)
footprint C_FLM_17X7H14 (CAP, POLYESTER, 17X7mm pitch: 15.0mm, 0.33uF 400V)
footprint C_FLM_18X5H11 (Capacitor, THT, Metallized Polyester Film 18x5x11mm LxTxH)
footprint C_FLM_18X6H12 (Capacitor, THT, Metallized Polyester Film 18x6x12.5mm LxTxH)
footprint C_FLM_18X7H14 (Capacitor, THT, Metallized Polyester Film 18x7x14mm LxTxH)
footprint C_FLM_18X8H15 (Capacitor, THT, Metallized Polyester Film 18x8x15mm LxTxH)
footprint C_FLM_18X9H14 (Capacitor, THT, Metallized Polyester Film 18x9x14mm LxTxH)
footprint C_FLM_18X9H16 (Capacitor, THT, Metallized Polyester Film 18x9x16mm LxTxH)
footprint C_FLM_18X11H14 (Capacitor, THT, Metallized Polyester Film 18x11x14mm LxTxH)
footprint C_FLM_19X5H13 (Capacitor, THT, Metallized Polyester Film 19x5x13mm LxTxH)
footprint C_FLM_19X6H14 (Capacitor, THT, Metallized Polyester Film 19x6x14mm LxTxH)
footprint C_FLM_19X7H15 (Capacitor, THT, Metallized Polyester Film 19x7x15mm LxTxH)
footprint C_FLM_19X8H11 (CAP, POLYESTER, MKT, 18X5, 19.0X8.0mm pitch: 15.0mm, 0.22uF 400V)
footprint C_FLM_19X8H17 (Capacitor, THT, Metallized Polyester Film 19x8x17mm LxTxH)
footprint C_FLM_19X10H18 (Capacitor, THT, Metallized Polyester Film 19x10x18 LxTxH)
footprint C_FLM_22X7H14 (CAP, POLYESTER, 33.0X7.0mm pitch: 20.0mm, 0.68uF 400V)
footprint C_FLM_24X6H9 (CAP, POLYESTER, 23.8X5.8mm pitch: 20.0mm, 0.33uF 400V)
footprint C_FLM_25X10H20 (Capacitor, THT, Metallized Polyester Film, 25x10x20)
footprint C_FLM_25X10H21 (Capacitor, THT, Metallized Polyester Film, 25x10x21mm)
footprint C_FLM_26X5H14 (Capacitor, THT, Metallized Polyester Film 26.5x5x14mm LxTxH)
footprint C_FLM_26X6H15 (Capacitor, THT, Metallized Polyester Film 26.5x6x15mm LxTxH)
footprint C_FLM_26X7H16 (Capacitor, THT, Metallized Polyester Film with 26.5x7x16.5mm LxTxH)
footprint C_FLM_26X8H15 (CAP, POLYESTER, 26.0X7.8mm pitch: 22.5mm, 0.68uF 400V)
footprint C_FLM_26X8H18 (Capacitor, THT, Metallized Polyester Film with 26.5x8.5x18.5mm LxTxH)
footprint C_FLM_26X9H14 (CAP, POLYESTER, 26.0X9.3mm pitch: 22.5mm, 0.68uF 400V)
footprint C_FLM_26X10H19 (Capacitor, THT, Metallized Polyester Film with 26.5x10.5x19mm LxTxH)
footprint C_FLM_26X10H20 (Capacitor, THT, Metallized Polyester Film with 26.5x10.5x20.5mm LxTxH)
footprint C_FLM_26X11H21 (Capacitor, THT, Metallized Polyester Film with 26.5x11x21mm LxTxH)
footprint C_FLM_28X8H20 (Capacitor, THT, Metallized Polyester Film with 28x8x20mm LxTxH)
footprint C_FLM_28X10H20 (Capacitor, THT, Metallized Polyester Film with 28x10x20mm LxTxH)
footprint C_FLM_28X12H21 (Capacitor, THT, Metallized Polyester Film with 28x12x21mm LxTxH)
pins: 1, 2

## CAP_THD_FLM_0.1uF_400v
designator C?, comment 0.1uF
CAP, FILM; PARAM: 400V; DESC: CAP, FILM,; MANF_P#: MANF_PART#; PRICE: 100= 1$; MANF: MANF; PARAM2: PARAM2; ASSEMBLY: ASSEMBLY; VALUE: 0.1uF
footprint C_FLM_9X6H9 (CAP, POLYESTER, 9.3X5.2mm pitch: 7.6mm)
pins: 1, 2

## CAP_THD_FLM_0.01uF_630v
designator C?, comment 0.01uF
CAP, FILM; PARAM: 630V; DESC: CAP, FILM,; MANF_P#: MANF_PART#; PRICE: 100= 1$; MANF: MANF; PARAM2: PARAM2; ASSEMBLY: ASSEMBLY; VALUE: 0.01uF
footprint C_FLM_13X5H11 (Capacitor, THT, Metallized Polyester Film 13x5x11mm LxTxH)
pins: 1, 2

## CAP_THD_FLM_0.22uF_400v
designator C?, comment 0.22uF
CAP, FILM; PARAM: 400V; DESC: CAP, FILM,; MANF_P#: MANF_PART#; PRICE: 100= 1$; MANF: MANF; PARAM2: PARAM2; ASSEMBLY: ASSEMBLY; VALUE: 0.22uF
footprint C_FLM_19X8H11 (CAP, POLYESTER, MKT, 18X5, 19.0X8.0mm pitch: 15.0mm, 0.22uF 400V)
pins: 1, 2

## CAP_THD_FLM_0.33uF_400v
designator C?, comment PARAM2: 400V  (hidden comment: 0.33uF)
CAP, THD, FILM,; MANF_P#: MANF_PART#; DESC: DESCRIPTION; DIST#: MOUSER; PARAM: 20%; PRICE: 10= 5$; MANF: MANF; ASSEMBLY: ASSEMBLY; VALUE: 0.33uF
footprint C_FLM_22X7H14 (CAP, POLYESTER, 33.0X7.0mm pitch: 20.0mm, 0.68uF 400V)
pins: 1, 2

## CAP_THD_FLM_0.47uF_400v
designator C?, comment PARAM2: 400V  (hidden comment: 0.47uF)
CAP, THD, FILM,; MANF_P#: MANF_PART#; DESC: DESCRIPTION; DIST#: MOUSER; PARAM: 20%; PRICE: 10= 5$; MANF: MANF; ASSEMBLY: ASSEMBLY; VALUE: 0.47uF
footprint C_FLM_22X7H14 (CAP, POLYESTER, 33.0X7.0mm pitch: 20.0mm, 0.68uF 400V)
pins: 1, 2

## CAP_THD_FLM_0.68uF_400v
designator C?, comment PARAM2: 400V  (hidden comment: 0.68uF)
CAP, THD, FILM,; MANF_P#: MANF_PART#; DESC: DESCRIPTION; DIST#: MOUSER; PARAM: 20%; PRICE: 10= 5$; MANF: MANF; ASSEMBLY: ASSEMBLY; VALUE: 0.68uF
footprint C_FLM_25X10H20 (Capacitor, THT, Metallized Polyester Film, 25x10x20)
pins: 1, 2

## CAP_THD_FLM_1uF_63v
designator C?, comment 1uF
CAP, FILM; PARAM: PET, 5%, AEC-Q200, -55~125oC; DESC: CAP, FILM,; MANF_P#: MKS2C041001F00JA00; MANF: WIMA; PARAM2: 63VDC/40VAC; PRICE: 0.37$; ASSEMBLY: ASSEMBLY; VALUE: 1uF
footprint C_FLM_7X5H10 (Capacitor, THT, Metallized Polyester Film with 7.2x5.0x10mm LxTxH)
pins: 1, 2